# Altium footprint library FootPrintLib_11.PcbLib: 376 footprints (part 1 of 24)
Each footprint in its own frame and in the unit in brackets; x right, y up, seen from the top. Pads: shape width x height; smd on the part's side, far side on the other; paste and mask are expansions set on the pad; w line width, h text height; cw(c..) or ccw(c..) is an arc to the next point about the centre after c.
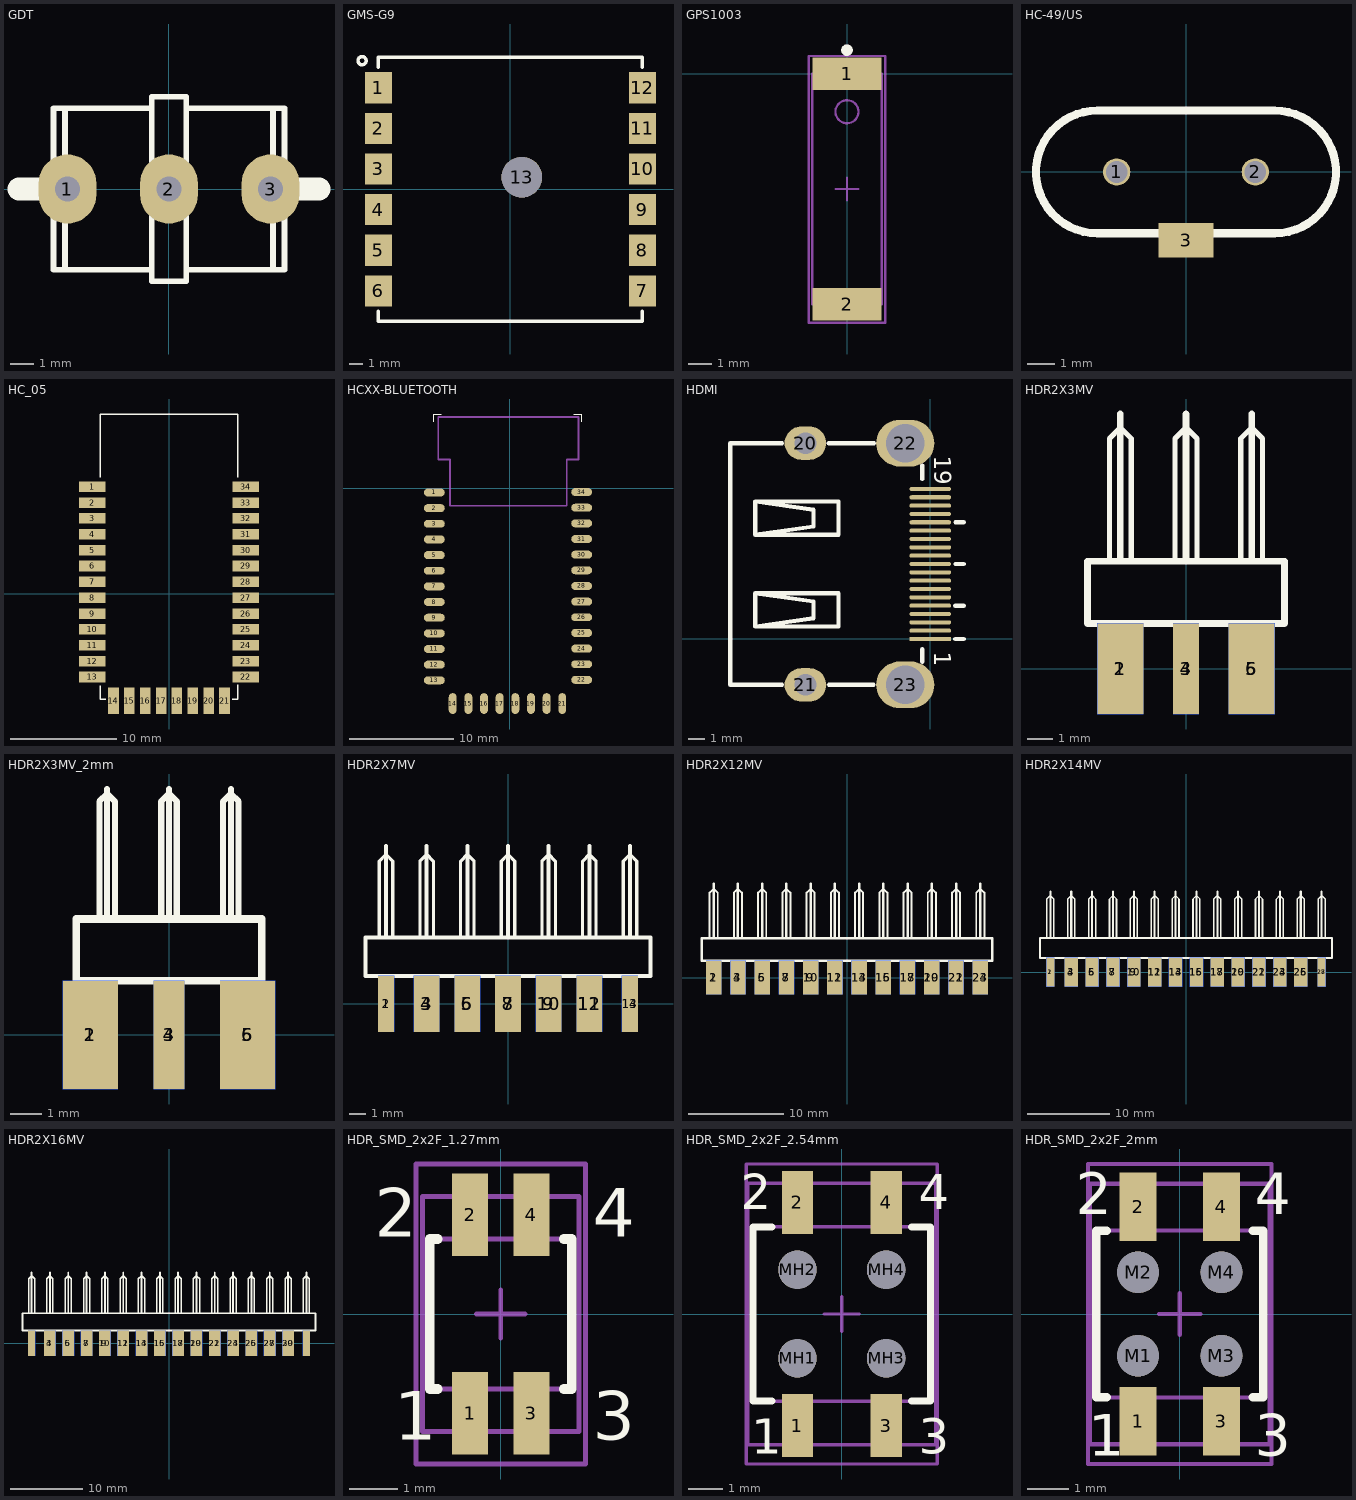
[diagram p0: the footprints below, top view; thin cyan lines are the x and y axes]

## GDT [mm] "3 Electrode Surge Arrester"
height 10.5
pads (3):
  oval 2.5x3 hole 1.1: 1(-4.4,0) 2(0,0) 3(4.4,0)
Top Overlay:
  lines w0.254: -4.5,-3.5 -4.5,3.5 ; -0.75,-3.5 -5,-3.5 -5,3.5 -0.75,3.5 ; 0.75,-3.5 5,-3.5 5,3.5 0.75,3.5 ; 4.5,-3.5 4.5,3.5 ; -0.75,-4 0.75,-4 0.75,4 -0.75,4 -0.75,-4
  lines w1: -6.5,0 -5,0 ; 5,0 6.5,0

## GMS-G9 [mm] "GNSS Module"
height 7.2
pads (13):
  rect 2x2.3 smd: 1(-9.75,7.5) 2(-9.75,4.5) 3(-9.75,1.5) 4(-9.75,-1.5) 5(-9.75,-4.5) 6(-9.75,-7.5) 7(9.75,-7.5) 8(9.75,-4.5) 9(9.75,-1.5) 10(9.75,1.5) 11(9.75,4.5) 12(9.75,7.5)
  round 3 hole 3 unplated: 13(0.85,0.9)
Top Overlay:
  circle w0.254: c-10.951,9.496 r0.3
  lines w0.254: -9.75,-9 -9.75,-9.75 9.75,-9.75 9.75,-9 ; -9.75,9 -9.75,9.75 9.75,9.75 9.75,9

## GPS1003 [mm] "GPS1003 1575MHz Multilayer Chip Antenna"
height 1.47
pads (2):
  rect 3x1.4 smd: 1(0,0) 2(0,-10)
Top Overlay:
  circle w0.25: c0,1.016 r0.125
Mechanical 13:
  circle w0.1: c0,-1.651 r0.5
  lines w0.1: -1.5,-10 1.5,-10 1.5,0 -1.5,0 -1.5,-10
  text "1575MHz" at -1.27,-1.016 h0.25
Mechanical 15:
  lines w0.1: -0.5,-5 0.5,-5 ; 0,-5.5 0,-4.5 ; -1.651,-10.795 1.651,-10.795 1.651,0.762 -1.651,0.762 -1.651,-10.795
3D body "User Library-ANT-GPS1003.STEP": height 1.48, standoff -0.01, extent -1.5,-10 1.5,0

## HC-49/US [mm] "HC/49US (AT49) MICROPROCESSOR CRYSTAL"
height 3.5
pads (3):
  round 1 / inner round 2 / far side round 2 hole 0.8: 1(-2.54,0) 2(2.54,0)
  rect 2x1.27 smd: 3(0,-2.5)
Top Overlay:
  lines w0.3: -3.25,-2.25 cw(c-3.25,0) -3.25,2.25 3.25,2.25 cw(c3.25,0) 3.25,-2.25 -3.25,-2.25
3D body "User Library-HC49S-1.STEP": height 3.6, standoff -3, extent -5.494,-2.246 5.486,2.246

## HC_05 [mm]
pads (34):
  rect 2.5x1 smd: 1(-7.25,10.125) 2(-7.25,8.625) 3(-7.25,7.125) 4(-7.25,5.625) 5(-7.25,4.125) 6(-7.25,2.625) 7(-7.25,1.125) 8(-7.25,-0.375) 9(-7.25,-1.875) 10(-7.25,-3.375) 11(-7.25,-4.875) 12(-7.25,-6.375) 13(-7.25,-7.875) 22(7.25,-7.875) 23(7.25,-6.375) 24(7.25,-4.875) 25(7.25,-3.375) 26(7.25,-1.875) 27(7.25,-0.375) 28(7.25,1.125) 29(7.25,2.625) 30(7.25,4.125) 31(7.25,5.625) 32(7.25,7.125) 33(7.25,8.625) 34(7.25,10.125)
  rect 1x2.5 smd: 14(-5.25,-10.125) 15(-3.75,-10.125) 16(-2.25,-10.125) 17(-0.75,-10.125) 18(0.75,-10.125) 19(2.25,-10.125) 20(3.75,-10.125) 21(5.25,-10.125)
Top Overlay:
  lines w0.127: -6.5,-8.7 -6.5,-10 -6,-10 ; -6.5,11 -6.5,17 6.5,17 6.5,11 ; 6,-10 6.5,-10 6.5,-8.6

## HCXX-BLUETOOTH [mm] "HCXX-BLUETOOTH"
pads (34):
  oval 2x0.76 smd: 1(-7.229,-0.381) 2(-7.229,-1.881) 3(-7.229,-3.381) 4(-7.229,-4.881) 5(-7.229,-6.381) 6(-7.229,-7.881) 7(-7.229,-9.381) 8(-7.229,-10.881) 9(-7.229,-12.381) 10(-7.229,-13.881) 11(-7.229,-15.381) 12(-7.229,-16.881) 13(-7.229,-18.381) 22(6.891,-18.341) 23(6.891,-16.841) 24(6.891,-15.341) 25(6.891,-13.841) 26(6.891,-12.341) 27(6.891,-10.841) 28(6.891,-9.341) 29(6.891,-7.841) 30(6.891,-6.341) 31(6.891,-4.841) 32(6.891,-3.341) 33(6.891,-1.841) 34(6.891,-0.341)
  oval 0.76x2 smd: 14(-5.469,-20.611) 15(-3.969,-20.611) 16(-2.469,-20.611) 17(-0.969,-20.611) 18(0.531,-20.611) 19(2.031,-20.611) 20(3.531,-20.611) 21(5.031,-20.611)
Top Overlay:
  lines w0.1: -7.299,6.389 -7.299,7.139 -6.549,7.139 ; 6.151,7.139 6.901,7.139 6.901,6.389
Mechanical 13:
  lines w0.178: -6.858,2.794 -6.858,6.858 6.604,6.858 6.604,2.794 5.461,2.794 5.461,-1.651 -5.715,-1.651 -5.715,2.794 -6.858,2.794

## HDMI [mm]
pads (23):
  rect 2.5x0.25 smd: 1(0,0)
  oval 2.5x0.25 smd: 2(0,0.5) 3(0,1) 4(0,1.5) 5(0,2) 6(0,2.5) 7(0,3) 8(0,3.5) 9(0,4) 10(0,4.5) 11(0,5) 12(0,5.5) 13(0,6) 14(0,6.5) 15(0,7) 16(0,7.5) 17(0,8) 18(0,8.5) 19(0,9)
  oval 2.5x2 hole 1.3: 20(-7.491,11.75) 21(-7.491,-2.75)
  oval 3.5x2.8 hole 2.3: 22(-1.5,11.75) 23(-1.5,-2.75)
Top Overlay:
  lines w0.254: -8.89,-2.75 -12,-2.75 -12,11.75 -8.89,11.75 ; -6.092,11.75 -3.378,11.75 ; -6.082,-2.75 -3.398,-2.75 ; -0.475,-1.372 -0.475,-0.61 ; -0.475,9.601 -0.475,10.406 ; 1.5,0 2.008,0 ; 1.5,2 2.008,2 ; 1.508,4.5 2.008,4.5 ; 1.508,7 2.008,7 ; -10.5,0.75 -7,1.25 -7,2.25 -10.5,2.75 ; -10.5,0.75 -10.5,2.75 ; -10.5,0.75 -5.5,0.75 -5.5,2.75 -10.5,2.75 ; -10.5,6.25 -7,6.75 -7,7.75 -10.5,8.25 ; -10.5,6.25 -10.5,8.25 ; -10.5,6.25 -5.5,6.25 -5.5,8.25 -10.5,8.25
  text "19" at 0.25,11 h1.02
  text "1" at 0.25,-0.75 h1.02
3D body "User Library-HDMI-19PIN.STEP": height 6.08, standoff -1.92, extent -11.021,-3.353 -1.121,12.847

## HDR2X3MV [mm] "Connector; Header; 3x2 Position"
pads (6):
  rect 1.778x3.5 smd: 1(-2.54,0) 5(2.54,0)
  rect 1.778x3.5 smd far side: 2(-2.54,0) 6(2.54,0)
  rect 1x3.5 smd: 3(0,0)
  rect 1x3.5 smd far side: 4(0,0)
Top Overlay:
  lines w0.2: -2.963,4.15 -2.963,8.908 -2.54,9.332 -2.117,8.908 -2.117,4.15 ; -0.423,4.15 -0.423,8.908 0,9.332 0.423,8.908 0.423,4.15 ; 2.117,4.15 2.117,8.908 2.54,9.332 2.963,8.908 2.963,4.15
  lines w0.254: -2.54,4.15 -2.54,9.85 ; 0,4.15 0,9.85 ; 2.54,4.15 2.54,9.85 ; -3.81,1.75 -3.81,4.15 3.81,4.15 3.81,1.75 -3.81,1.75
3D body "User Library-Single Pin Header.STEP": height 2.37, standoff -0.17, extent 1.27,-0.787 3.81,10.008
3D body "User Library-Single Pin Header.STEP": height 2.37, standoff -0.17, extent 1.27,-0.787 3.81,10.008
3D body "User Library-Single Pin Header.STEP": height 2.37, standoff -0.17, extent -1.27,-0.787 1.27,10.008
3D body "User Library-Single Pin Header.STEP": height 2.37, standoff -0.17, extent -1.27,-0.787 1.27,10.008
3D body "User Library-Single Pin Header.STEP": height 2.37, standoff -0.17, extent -3.81,-0.787 -1.27,10.008
3D body "User Library-Single Pin Header.STEP": height 2.37, standoff -0.17, extent -3.81,-0.787 -1.27,10.008

## HDR2X3MV_2mm [mm] "Connector; Header; 3x2 Position"
pads (6):
  rect 1.778x3.5 smd: 1(-2.54,0) 5(2.54,0)
  rect 1.778x3.5 smd far side: 2(-2.54,0) 6(2.54,0)
  rect 1x3.5 smd: 3(0,0)
  rect 1x3.5 smd far side: 4(0,0)
Top Overlay:
  lines w0.2: -2.25,3.75 -2.25,7.55 -2,7.8 -1.75,7.55 -1.75,3.75 ; -2,3.75 -2,7.95 ; -0.25,3.75 -0.25,7.55 0,7.8 0.25,7.55 0.25,3.75 ; 0,3.75 0,7.95 ; 1.75,3.75 1.75,7.55 2,7.8 2.25,7.55 2.25,3.75 ; 2,3.75 2,7.95
  lines w0.254: -3,1.75 -3,3.75 3,3.75 3,1.75 -3,1.75
3D body "pin_header_a-sl200-eg-g03d.stp": height 2, standoff 0, extent -2.975,-1.1 2.975,7.7
3D body "pin_header_a-sl200-eg-g03d.stp": height 0, standoff -2, extent -2.975,-1.1 2.975,7.7

## HDR2X7MV [mm] "Connector; Header; 2x7 Position"
pads (14):
  rect 1x3.5 smd: 1(-7.62,0) 13(7.62,0)
  rect 1x3.5 smd far side: 2(-7.62,0) 14(7.62,0)
  rect 1.6x3.5 smd: 3(-5.08,0) 5(-2.54,0) 7(0,0) 9(2.54,0) 11(5.08,0)
  rect 1.6x3.5 smd far side: 4(-5.08,0) 6(-2.54,0) 8(0,0) 10(2.54,0) 12(5.08,0)
Top Overlay:
  lines w0.2: -8.043,4.15 -8.043,8.908 -7.62,9.332 -7.197,8.908 -7.197,4.15 ; -5.503,4.15 -5.503,8.908 -5.08,9.332 -4.657,8.908 -4.657,4.15 ; -2.963,4.15 -2.963,8.908 -2.54,9.332 -2.117,8.908 -2.117,4.15 ; -0.423,4.15 -0.423,8.908 0,9.332 0.423,8.908 0.423,4.15 ; 2.117,4.15 2.117,8.908 2.54,9.332 2.963,8.908 2.963,4.15 ; 4.657,4.15 4.657,8.908 5.08,9.332 5.503,8.908 5.503,4.15 ; 7.197,4.15 7.197,8.908 7.62,9.332 8.043,8.908 8.043,4.15
  lines w0.254: -7.62,4.15 -7.62,9.85 ; -5.08,4.15 -5.08,9.85 ; -2.54,4.15 -2.54,9.85 ; 0,4.15 0,9.85 ; 2.54,4.15 2.54,9.85 ; 5.08,4.15 5.08,9.85 ; 7.62,4.15 7.62,9.85 ; -8.89,1.75 8.89,1.75 8.89,4.15 -8.89,4.15 -8.89,1.75
3D body "User Library-Single Pin Header.STEP": height 2.37, standoff -0.17, extent 1.27,-0.787 3.81,10.008
3D body "User Library-Single Pin Header.STEP": height 2.37, standoff -0.17, extent 1.27,-0.787 3.81,10.008
3D body "User Library-Single Pin Header.STEP": height 2.37, standoff -0.17, extent 3.81,-0.787 6.35,10.008
3D body "User Library-Single Pin Header.STEP": height 2.37, standoff -0.17, extent 3.81,-0.787 6.35,10.008
3D body "User Library-Single Pin Header.STEP": height 2.37, standoff -0.17, extent 6.35,-0.787 8.89,10.008
3D body "User Library-Single Pin Header.STEP": height 2.37, standoff -0.17, extent 6.35,-0.787 8.89,10.008
3D body "User Library-Single Pin Header.STEP": height 2.37, standoff -0.17, extent -1.27,-0.787 1.27,10.008
3D body "User Library-Single Pin Header.STEP": height 2.37, standoff -0.17, extent -1.27,-0.787 1.27,10.008
3D body "User Library-Single Pin Header.STEP": height 2.37, standoff -0.17, extent -3.81,-0.787 -1.27,10.008
3D body "User Library-Single Pin Header.STEP": height 2.37, standoff -0.17, extent -3.81,-0.787 -1.27,10.008
3D body "User Library-Single Pin Header.STEP": height 2.37, standoff -0.17, extent -8.89,-0.787 -6.35,10.008
3D body "User Library-Single Pin Header.STEP": height 2.37, standoff -0.17, extent -8.89,-0.787 -6.35,10.008
3D body "User Library-Single Pin Header.STEP": height 2.37, standoff -0.17, extent -6.35,-0.787 -3.81,10.008
3D body "User Library-Single Pin Header.STEP": height 2.37, standoff -0.17, extent -6.35,-0.787 -3.81,10.008

## HDR2X12MV [mm] "Connector; Header; 3x2 Position"
pads (24):
  rect 1.6x3.5 smd: 1(-13.97,0) 3(-11.43,0) 5(-8.89,0) 7(-6.35,0) 9(-3.81,0) 11(-1.27,0) 13(1.27,0) 15(3.81,0) 17(6.35,0) 19(8.89,0) 21(11.43,0) 23(13.97,0)
  rect 1.6x3.5 smd far side: 2(-13.97,0) 4(-11.43,0) 6(-8.89,0) 8(-6.35,0) 10(-3.81,0) 12(-1.27,0) 14(1.27,0) 16(3.81,0) 18(6.35,0) 20(8.89,0) 22(11.43,0) 24(13.97,0)
Top Overlay:
  lines w0.2: -14.393,4.15 -14.393,8.908 -13.97,9.332 -13.547,8.908 -13.547,4.15 ; -11.853,4.15 -11.853,8.908 -11.43,9.332 -11.007,8.908 -11.007,4.15 ; -9.313,4.15 -9.313,8.908 -8.89,9.332 -8.467,8.908 -8.467,4.15 ; -6.773,4.15 -6.773,8.908 -6.35,9.332 -5.927,8.908 -5.927,4.15 ; -4.233,4.15 -4.233,8.908 -3.81,9.332 -3.387,8.908 -3.387,4.15 ; -1.693,4.15 -1.693,8.908 -1.27,9.332 -0.847,8.908 -0.847,4.15 ; 0.847,4.15 0.847,8.908 1.27,9.332 1.693,8.908 1.693,4.15 ; 3.387,4.15 3.387,8.908 3.81,9.332 4.233,8.908 4.233,4.15 ; 5.927,4.15 5.927,8.908 6.35,9.332 6.773,8.908 6.773,4.15 ; 8.467,4.15 8.467,8.908 8.89,9.332 9.313,8.908 9.313,4.15 ; 11.007,4.15 11.007,8.908 11.43,9.332 11.853,8.908 11.853,4.15 ; 13.547,4.15 13.547,8.908 13.97,9.332 14.393,8.908 14.393,4.15
  lines w0.254: -13.97,4.15 -13.97,9.85 ; -11.43,4.15 -11.43,9.85 ; -8.89,4.15 -8.89,9.85 ; -6.35,4.15 -6.35,9.85 ; -3.81,4.15 -3.81,9.85 ; -1.27,4.15 -1.27,9.85 ; 1.27,4.15 1.27,9.85 ; 3.81,4.15 3.81,9.85 ; 6.35,4.15 6.35,9.85 ; 8.89,4.15 8.89,9.85 ; 11.43,4.15 11.43,9.85 ; 13.97,4.15 13.97,9.85 ; -15.24,1.75 15.24,1.75 15.24,4.15 -15.24,4.15 -15.24,1.75
3D body "User Library-Single Pin Header.STEP": height 2.37, standoff -0.17, extent 12.7,-0.787 15.24,10.008
3D body "User Library-Single Pin Header.STEP": height 2.37, standoff -0.17, extent 12.7,-0.787 15.24,10.008
3D body "User Library-Single Pin Header.STEP": height 2.37, standoff -0.17, extent 2.54,-0.787 5.08,10.008
3D body "User Library-Single Pin Header.STEP": height 2.37, standoff -0.17, extent 2.54,-0.787 5.08,10.008
3D body "User Library-Single Pin Header.STEP": height 2.37, standoff -0.17, extent 10.16,-0.787 12.7,10.008
3D body "User Library-Single Pin Header.STEP": height 2.37, standoff -0.17, extent 10.16,-0.787 12.7,10.008
3D body "User Library-Single Pin Header.STEP": height 2.37, standoff -0.17, extent 7.62,-0.787 10.16,10.008
3D body "User Library-Single Pin Header.STEP": height 2.37, standoff -0.17, extent 7.62,-0.787 10.16,10.008
3D body "User Library-Single Pin Header.STEP": height 2.37, standoff -0.17, extent 5.08,-0.787 7.62,10.008
3D body "User Library-Single Pin Header.STEP": height 2.37, standoff -0.17, extent 5.08,-0.787 7.62,10.008
3D body "User Library-Single Pin Header.STEP": height 2.37, standoff -0.17, extent -5.08,-0.787 -2.54,10.008
3D body "User Library-Single Pin Header.STEP": height 2.37, standoff -0.17, extent -5.08,-0.787 -2.54,10.008
3D body "User Library-Single Pin Header.STEP": height 2.37, standoff -0.17, extent -2.54,-0.787 0,10.008
3D body "User Library-Single Pin Header.STEP": height 2.37, standoff -0.17, extent -2.54,-0.787 0,10.008
3D body "User Library-Single Pin Header.STEP": height 2.37, standoff -0.17, extent 0,-0.787 2.54,10.008
3D body "User Library-Single Pin Header.STEP": height 2.37, standoff -0.17, extent 0,-0.787 2.54,10.008
3D body "User Library-Single Pin Header.STEP": height 2.37, standoff -0.17, extent -7.62,-0.787 -5.08,10.008
3D body "User Library-Single Pin Header.STEP": height 2.37, standoff -0.17, extent -7.62,-0.787 -5.08,10.008
3D body "User Library-Single Pin Header.STEP": height 2.37, standoff -0.17, extent -10.16,-0.787 -7.62,10.008
3D body "User Library-Single Pin Header.STEP": height 2.37, standoff -0.17, extent -10.16,-0.787 -7.62,10.008
3D body "User Library-Single Pin Header.STEP": height 2.37, standoff -0.17, extent -15.24,-0.787 -12.7,10.008
3D body "User Library-Single Pin Header.STEP": height 2.37, standoff -0.17, extent -15.24,-0.787 -12.7,10.008
3D body "User Library-Single Pin Header.STEP": height 2.37, standoff -0.17, extent -12.7,-0.787 -10.16,10.008
3D body "User Library-Single Pin Header.STEP": height 2.37, standoff -0.17, extent -12.7,-0.787 -10.16,10.008

## HDR2X14MV [mm] "Connector; Header; 2x14 Position"
pads (28):
  rect 1x3.5 smd: 1(-16.51,0) 27(16.51,0)
  rect 1x3.5 smd far side: 2(-16.51,0) 28(16.51,0)
  rect 1.6x3.5 smd: 3(-13.97,0) 5(-11.43,0) 7(-8.89,0) 9(-6.35,0) 11(-3.81,0) 13(-1.27,0) 15(1.27,0) 17(3.81,0) 19(6.35,0) 21(8.89,0) 23(11.43,0) 25(13.97,0)
  rect 1.6x3.5 smd far side: 4(-13.97,0) 6(-11.43,0) 8(-8.89,0) 10(-6.35,0) 12(-3.81,0) 14(-1.27,0) 16(1.27,0) 18(3.81,0) 20(6.35,0) 22(8.89,0) 24(11.43,0) 26(13.97,0)
Top Overlay:
  lines w0.2: -16.933,4.15 -16.933,8.908 -16.51,9.332 -16.087,8.908 -16.087,4.15 ; -14.393,4.15 -14.393,8.908 -13.97,9.332 -13.547,8.908 -13.547,4.15 ; -11.853,4.15 -11.853,8.908 -11.43,9.332 -11.007,8.908 -11.007,4.15 ; -9.313,4.15 -9.313,8.908 -8.89,9.332 -8.467,8.908 -8.467,4.15 ; -6.773,4.15 -6.773,8.908 -6.35,9.332 -5.927,8.908 -5.927,4.15 ; -4.233,4.15 -4.233,8.908 -3.81,9.332 -3.387,8.908 -3.387,4.15 ; -1.693,4.15 -1.693,8.908 -1.27,9.332 -0.847,8.908 -0.847,4.15 ; 0.847,4.15 0.847,8.908 1.27,9.332 1.693,8.908 1.693,4.15 ; 3.387,4.15 3.387,8.908 3.81,9.332 4.233,8.908 4.233,4.15 ; 5.927,4.15 5.927,8.908 6.35,9.332 6.773,8.908 6.773,4.15 ; 8.467,4.15 8.467,8.908 8.89,9.332 9.313,8.908 9.313,4.15 ; 11.007,4.15 11.007,8.908 11.43,9.332 11.853,8.908 11.853,4.15 ; 13.547,4.15 13.547,8.908 13.97,9.332 14.393,8.908 14.393,4.15 ; 16.087,4.15 16.087,8.908 16.51,9.332 16.933,8.908 16.933,4.15
  lines w0.254: -16.51,4.15 -16.51,9.85 ; -13.97,4.15 -13.97,9.85 ; -11.43,4.15 -11.43,9.85 ; -8.89,4.15 -8.89,9.85 ; -6.35,4.15 -6.35,9.85 ; -3.81,4.15 -3.81,9.85 ; -1.27,4.15 -1.27,9.85 ; 1.27,4.15 1.27,9.85 ; 3.81,4.15 3.81,9.85 ; 6.35,4.15 6.35,9.85 ; 8.89,4.15 8.89,9.85 ; 11.43,4.15 11.43,9.85 ; 13.97,4.15 13.97,9.85 ; 16.51,4.15 16.51,9.85 ; -17.78,1.75 17.78,1.75 17.78,4.15 -17.78,4.15 -17.78,1.75
3D body "User Library-Single Pin Header.STEP": height 2.37, standoff -0.17, extent 10.16,-0.787 12.7,10.008
3D body "User Library-Single Pin Header.STEP": height 2.37, standoff -0.17, extent 10.16,-0.787 12.7,10.008
3D body "User Library-Single Pin Header.STEP": height 2.37, standoff -0.17, extent 0,-0.787 2.54,10.008
3D body "User Library-Single Pin Header.STEP": height 2.37, standoff -0.17, extent 0,-0.787 2.54,10.008
3D body "User Library-Single Pin Header.STEP": height 2.37, standoff -0.17, extent 7.62,-0.787 10.16,10.008
3D body "User Library-Single Pin Header.STEP": height 2.37, standoff -0.17, extent 7.62,-0.787 10.16,10.008
3D body "User Library-Single Pin Header.STEP": height 2.37, standoff -0.17, extent 5.08,-0.787 7.62,10.008
3D body "User Library-Single Pin Header.STEP": height 2.37, standoff -0.17, extent 5.08,-0.787 7.62,10.008
3D body "User Library-Single Pin Header.STEP": height 2.37, standoff -0.17, extent 2.54,-0.787 5.08,10.008
3D body "User Library-Single Pin Header.STEP": height 2.37, standoff -0.17, extent 2.54,-0.787 5.08,10.008
3D body "User Library-Single Pin Header.STEP": height 2.37, standoff -0.17, extent -7.62,-0.787 -5.08,10.008
3D body "User Library-Single Pin Header.STEP": height 2.37, standoff -0.17, extent -7.62,-0.787 -5.08,10.008
3D body "User Library-Single Pin Header.STEP": height 2.37, standoff -0.17, extent -5.08,-0.787 -2.54,10.008
3D body "User Library-Single Pin Header.STEP": height 2.37, standoff -0.17, extent -5.08,-0.787 -2.54,10.008
3D body "User Library-Single Pin Header.STEP": height 2.37, standoff -0.17, extent -2.54,-0.787 0,10.008
3D body "User Library-Single Pin Header.STEP": height 2.37, standoff -0.17, extent -2.54,-0.787 0,10.008
3D body "User Library-Single Pin Header.STEP": height 2.37, standoff -0.17, extent -10.16,-0.787 -7.62,10.008
3D body "User Library-Single Pin Header.STEP": height 2.37, standoff -0.17, extent -10.16,-0.787 -7.62,10.008
3D body "User Library-Single Pin Header.STEP": height 2.37, standoff -0.17, extent -12.7,-0.787 -10.16,10.008
3D body "User Library-Single Pin Header.STEP": height 2.37, standoff -0.17, extent -12.7,-0.787 -10.16,10.008
3D body "User Library-Single Pin Header.STEP": height 2.37, standoff -0.17, extent -17.78,-0.787 -15.24,10.008
3D body "User Library-Single Pin Header.STEP": height 2.37, standoff -0.17, extent -17.78,-0.787 -15.24,10.008
3D body "User Library-Single Pin Header.STEP": height 2.37, standoff -0.17, extent -15.24,-0.787 -12.7,10.008
3D body "User Library-Single Pin Header.STEP": height 2.37, standoff -0.17, extent -15.24,-0.787 -12.7,10.008
3D body "User Library-Single Pin Header.STEP": height 2.37, standoff -0.17, extent 12.7,-0.787 15.24,10.008
3D body "User Library-Single Pin Header.STEP": height 2.37, standoff -0.17, extent 12.7,-0.787 15.24,10.008
3D body "User Library-Single Pin Header.STEP": height 2.37, standoff -0.17, extent 15.24,-0.787 17.78,10.008
3D body "User Library-Single Pin Header.STEP": height 2.37, standoff -0.17, extent 15.24,-0.787 17.78,10.008

## HDR2X16MV [mm] "Connector; Header; 2x16 Position"
pads (32):
  rect 1x3.5 smd: 1(-19.05,0) 31(19.05,0)
  rect 1x3.5 smd far side: 2(-19.05,0) 32(19.05,0)
  rect 1.6x3.5 smd: 3(-16.51,0) 5(-13.97,0) 7(-11.43,0) 9(-8.89,0) 11(-6.35,0) 13(-3.81,0) 15(-1.27,0) 17(1.27,0) 19(3.81,0) 21(6.35,0) 23(8.89,0) 25(11.43,0) 27(13.97,0) 29(16.51,0)
  rect 1.6x3.5 smd far side: 4(-16.51,0) 6(-13.97,0) 8(-11.43,0) 10(-8.89,0) 12(-6.35,0) 14(-3.81,0) 16(-1.27,0) 18(1.27,0) 20(3.81,0) 22(6.35,0) 24(8.89,0) 26(11.43,0) 28(13.97,0) 30(16.51,0)
Top Overlay:
  lines w0.2: -19.473,4.15 -19.473,8.908 -19.05,9.332 -18.627,8.908 -18.627,4.15 ; -16.933,4.15 -16.933,8.908 -16.51,9.332 -16.087,8.908 -16.087,4.15 ; -14.393,4.15 -14.393,8.908 -13.97,9.332 -13.547,8.908 -13.547,4.15 ; -11.853,4.15 -11.853,8.908 -11.43,9.332 -11.007,8.908 -11.007,4.15 ; -9.313,4.15 -9.313,8.908 -8.89,9.332 -8.467,8.908 -8.467,4.15 ; -6.773,4.15 -6.773,8.908 -6.35,9.332 -5.927,8.908 -5.927,4.15 ; -4.233,4.15 -4.233,8.908 -3.81,9.332 -3.387,8.908 -3.387,4.15 ; -1.693,4.15 -1.693,8.908 -1.27,9.332 -0.847,8.908 -0.847,4.15 ; 0.847,4.15 0.847,8.908 1.27,9.332 1.693,8.908 1.693,4.15 ; 3.387,4.15 3.387,8.908 3.81,9.332 4.233,8.908 4.233,4.15 ; 5.927,4.15 5.927,8.908 6.35,9.332 6.773,8.908 6.773,4.15 ; 8.467,4.15 8.467,8.908 8.89,9.332 9.313,8.908 9.313,4.15 ; 11.007,4.15 11.007,8.908 11.43,9.332 11.853,8.908 11.853,4.15 ; 13.547,4.15 13.547,8.908 13.97,9.332 14.393,8.908 14.393,4.15 ; 16.087,4.15 16.087,8.908 16.51,9.332 16.933,8.908 16.933,4.15 ; 18.627,4.15 18.627,8.908 19.05,9.332 19.473,8.908 19.473,4.15
  lines w0.254: -19.05,4.15 -19.05,9.85 ; -16.51,4.15 -16.51,9.85 ; -13.97,4.15 -13.97,9.85 ; -11.43,4.15 -11.43,9.85 ; -8.89,4.15 -8.89,9.85 ; -6.35,4.15 -6.35,9.85 ; -3.81,4.15 -3.81,9.85 ; -1.27,4.15 -1.27,9.85 ; 1.27,4.15 1.27,9.85 ; 3.81,4.15 3.81,9.85 ; 6.35,4.15 6.35,9.85 ; 8.89,4.15 8.89,9.85 ; 11.43,4.15 11.43,9.85 ; 13.97,4.15 13.97,9.85 ; 16.51,4.15 16.51,9.85 ; 19.05,4.15 19.05,9.85 ; -20.32,1.75 20.32,1.75 20.32,4.15 -20.32,4.15 -20.32,1.75
3D body "User Library-Single Pin Header.STEP": height 2.37, standoff -0.17, extent 17.78,-0.787 20.32,10.008
3D body "User Library-Single Pin Header.STEP": height 2.37, standoff -0.17, extent 17.78,-0.787 20.32,10.008
3D body "User Library-Single Pin Header.STEP": height 2.37, standoff -0.17, extent 15.24,-0.787 17.78,10.008
3D body "User Library-Single Pin Header.STEP": height 2.37, standoff -0.17, extent 15.24,-0.787 17.78,10.008
3D body "User Library-Single Pin Header.STEP": height 2.37, standoff -0.17, extent 7.62,-0.787 10.16,10.008
3D body "User Library-Single Pin Header.STEP": height 2.37, standoff -0.17, extent 7.62,-0.787 10.16,10.008
3D body "User Library-Single Pin Header.STEP": height 2.37, standoff -0.17, extent -2.54,-0.787 0,10.008
3D body "User Library-Single Pin Header.STEP": height 2.37, standoff -0.17, extent -2.54,-0.787 0,10.008
3D body "User Library-Single Pin Header.STEP": height 2.37, standoff -0.17, extent 5.08,-0.787 7.62,10.008
3D body "User Library-Single Pin Header.STEP": height 2.37, standoff -0.17, extent 5.08,-0.787 7.62,10.008
3D body "User Library-Single Pin Header.STEP": height 2.37, standoff -0.17, extent 2.54,-0.787 5.08,10.008
3D body "User Library-Single Pin Header.STEP": height 2.37, standoff -0.17, extent 2.54,-0.787 5.08,10.008
3D body "User Library-Single Pin Header.STEP": height 2.37, standoff -0.17, extent 0,-0.787 2.54,10.008
3D body "User Library-Single Pin Header.STEP": height 2.37, standoff -0.17, extent 0,-0.787 2.54,10.008
3D body "User Library-Single Pin Header.STEP": height 2.37, standoff -0.17, extent -10.16,-0.787 -7.62,10.008
3D body "User Library-Single Pin Header.STEP": height 2.37, standoff -0.17, extent -10.16,-0.787 -7.62,10.008
3D body "User Library-Single Pin Header.STEP": height 2.37, standoff -0.17, extent -7.62,-0.787 -5.08,10.008
3D body "User Library-Single Pin Header.STEP": height 2.37, standoff -0.17, extent -7.62,-0.787 -5.08,10.008
3D body "User Library-Single Pin Header.STEP": height 2.37, standoff -0.17, extent -5.08,-0.787 -2.54,10.008
3D body "User Library-Single Pin Header.STEP": height 2.37, standoff -0.17, extent -5.08,-0.787 -2.54,10.008
3D body "User Library-Single Pin Header.STEP": height 2.37, standoff -0.17, extent -12.7,-0.787 -10.16,10.008
3D body "User Library-Single Pin Header.STEP": height 2.37, standoff -0.17, extent -12.7,-0.787 -10.16,10.008
3D body "User Library-Single Pin Header.STEP": height 2.37, standoff -0.17, extent -15.24,-0.787 -12.7,10.008
3D body "User Library-Single Pin Header.STEP": height 2.37, standoff -0.17, extent -15.24,-0.787 -12.7,10.008
3D body "User Library-Single Pin Header.STEP": height 2.37, standoff -0.17, extent -20.32,-0.787 -17.78,10.008
3D body "User Library-Single Pin Header.STEP": height 2.37, standoff -0.17, extent -20.32,-0.787 -17.78,10.008
3D body "User Library-Single Pin Header.STEP": height 2.37, standoff -0.17, extent -17.78,-0.787 -15.24,10.008
3D body "User Library-Single Pin Header.STEP": height 2.37, standoff -0.17, extent -17.78,-0.787 -15.24,10.008
3D body "User Library-Single Pin Header.STEP": height 2.37, standoff -0.17, extent 10.16,-0.787 12.7,10.008
3D body "User Library-Single Pin Header.STEP": height 2.37, standoff -0.17, extent 10.16,-0.787 12.7,10.008
3D body "User Library-Single Pin Header.STEP": height 2.37, standoff -0.17, extent 12.7,-0.787 15.24,10.008
3D body "User Library-Single Pin Header.STEP": height 2.37, standoff -0.17, extent 12.7,-0.787 15.24,10.008

## HDR_SMD_2x2F_1.27mm [mm] "Socket Header, Pitch 1.27 mm, SMT, Vertical, dual row, 4p"
height 4.7
pads (4):
  rect 0.74x1.7 smd: 1(-0.635,-2.05) 2(-0.635,2.05) 3(0.635,-2.05) 4(0.635,2.05)
Top Overlay:
  lines w0.2: -1.3,-1.55 -1.47,-1.55 -1.47,1.55 -1.3,1.55 ; 1.3,-1.55 1.47,-1.55 1.47,1.55 1.3,1.55
  text "4" at 1.9,1.6 h1
  text "2" at -2.6,1.6 h1
  text "3" at 1.9,-2.6 h1
  text "1" at -2.2,-2.6 h1
Mechanical 11:
  lines w0.1: -1.47,-1.55 -1.47,1.55 1.47,1.55 1.47,-1.55 -1.47,-1.55
Mechanical 13:
  lines w0.1: -1.62,-2.425 1.62,-2.425 1.62,2.425 -1.62,2.425 -1.62,-2.425
Mechanical 15:
  lines w0.1: -0.5,0 0.5,0 ; 0,-0.5 0,0.5 ; -1.75,-3.1 1.75,-3.1 1.75,3.1 -1.75,3.1 -1.75,-3.1
3D body "62300421021.stp": height 4.6, standoff 0, extent -1.47,-2.299 1.47,2.299

## HDR_SMD_2x2F_2.54mm [mm] "Socket Header, Pitch 2.54 mm, SMT, Vertical, dual row, 4p"
height 3.7
pads (8):
  rect 0.9x1.8 smd: 1(-1.27,-3.2) 2(-1.27,3.2) 3(1.27,-3.2) 4(1.27,3.2)
  round 1.1 hole 1.1 unplated: MH1(-1.27,-1.27) MH2(-1.27,1.27) MH3(1.27,-1.27) MH4(1.27,1.27)
Top Overlay:
  lines w0.2: -2,-2.5 -2.54,-2.5 -2.54,2.5 -2,2.5 ; 2,-2.5 2.54,-2.5 2.54,2.5 2,2.5
  text "1" at -2.6,-4 h1
  text "3" at 2.2,-4 h1
  text "4" at 2.2,3 h1
  text "2" at -2.9,3 h1
Mechanical 11:
  lines w0.1: -2.54,-2.5 -2.54,2.5 2.54,2.5 2.54,-2.5 -2.54,-2.5
Mechanical 13:
  lines w0.1: -2.69,-3.75 -2.69,3.75 2.69,3.75 2.69,-3.75 -2.69,-3.75
Mechanical 15:
  lines w0.1: -0.5,0 0.5,0 ; 0,-0.5 0,0.5 ; -2.74,-4.3 -2.74,4.3 2.74,4.3 2.74,-4.3 -2.74,-4.3
3D body "610004243021.stp": height 3.7, standoff 0, extent -2.54,-3.603 2.54,3.603

## HDR_SMD_2x2F_2mm [mm] "Socket Header, Pitch 2.00 mm, SMT, Vertical, dual row, 4p"
height 2.35
pads (8):
  rect 0.89x1.65 smd: 1(-1,-2.575) 2(-1,2.575) 3(1,-2.575) 4(1,2.575)
  round 1 hole 1 unplated: M1(-1,-1) M2(-1,1) M3(1,-1) M4(1,1)
Top Overlay:
  lines w0.2: -1.75,-2 -2,-2 -2,2 -1.75,2 ; 1.75,-2 2,-2 2,2 1.75,2
  text "2" at -2.5,2.4 h1
  text "4" at 1.8,2.4 h1
  text "3" at 1.8,-3.4 h1
  text "1" at -2.2,-3.4 h1
Mechanical 11:
  lines w0.1: -2,-2 -2,2 2,2 2,-2 -2,-2
Mechanical 13:
  lines w0.1: -2.15,-3.125 -2.15,3.125 2.15,3.125 2.15,-3.125 -2.15,-3.125
Mechanical 15:
  lines w0.1: -0.5,0 0.5,0 ; 0,-0.5 0,0.5 ; -2.2,-3.6 -2.2,3.6 2.2,3.6 2.2,-3.6 -2.2,-3.6
3D body "62100421821.stp": height 2.1, standoff 0, extent -2,-3 2,3